# Altium footprint library Amin-Library.PcbLib: 601 footprints (part 27 of 38)
Each footprint in its own frame and in the unit in brackets; x right, y up, seen from the top. Pads: shape width x height; smd on the part's side, far side on the other; paste and mask are expansions set on the pad; w line width, h text height; cw(c..) or ccw(c..) is an arc to the next point about the centre after c.
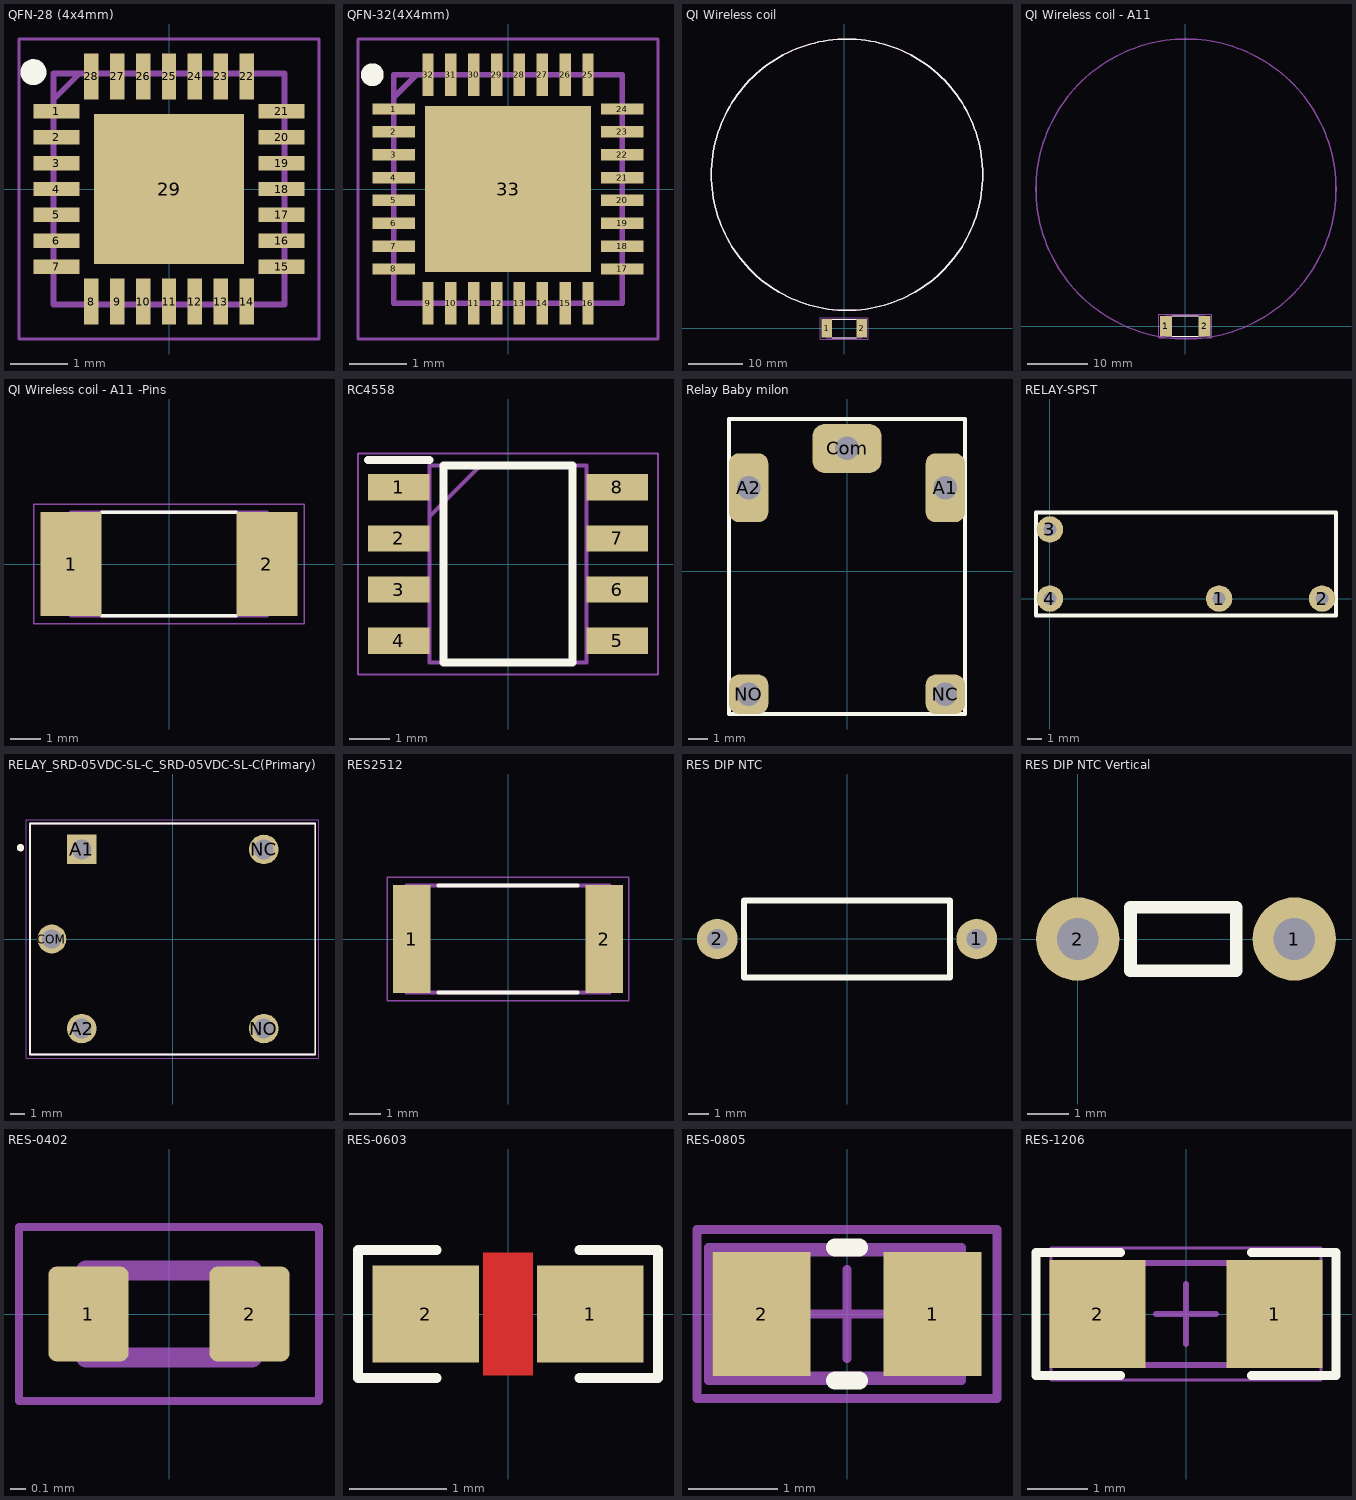
[diagram p26: the footprints below, top view; thin cyan lines are the x and y axes]

## QFN-28 (4x4mm) [mm]
pads (29):
  rect 0.8x0.25 smd: 1(-1.95,1.35) 2(-1.95,0.9) 3(-1.95,0.45) 4(-1.95,0) 5(-1.95,-0.45) 6(-1.95,-0.9) 7(-1.95,-1.35) 15(1.95,-1.35) 16(1.95,-0.9) 17(1.95,-0.45) 18(1.95,0) 19(1.95,0.45) 20(1.95,0.9) 21(1.95,1.35)
  rect 0.25x0.8 smd: 8(-1.35,-1.95) 9(-0.9,-1.95) 10(-0.45,-1.95) 11(0,-1.95) 12(0.45,-1.95) 13(0.9,-1.95) 14(1.35,-1.95) 22(1.35,1.95) 23(0.9,1.95) 24(0.45,1.95) 25(0,1.95) 26(-0.45,1.95) 27(-0.9,1.95) 28(-1.35,1.95)
  rect 2.6x2.6 smd: 29(0,0)
Top Overlay:
  circle w0.225: c-2.351,2.025 r0.112
Mechanical 15:
  lines w0.1: -2,1.55 -1.55,2 ; -2,-2 -2,2 2,2 2,-2 -2,-2
Mechanical 20:
  lines w0.05: -2.6,-2.6 -2.6,2.6 2.6,2.6 2.6,-2.6 -2.6,-2.6
3D body "QFN-28(4x4mm).stp": height 0.9, standoff 0, extent -2.05,-2.05 2.05,2.05

## QFN-32(4X4mm) [mm]
pads (33):
  rect 0.75x0.2 smd: 1(-2,1.4) 2(-2,1) 3(-2,0.6) 4(-2,0.2) 5(-2,-0.2) 6(-2,-0.6) 7(-2,-1) 8(-2,-1.4) 17(2,-1.4) 18(2,-1) 19(2,-0.6) 20(2,-0.2) 21(2,0.2) 22(2,0.6) 23(2,1) 24(2,1.4)
  rect 0.2x0.75 smd: 9(-1.4,-2) 10(-1,-2) 11(-0.6,-2) 12(-0.2,-2) 13(0.2,-2) 14(0.6,-2) 15(1,-2) 16(1.4,-2) 25(1.4,2) 26(1,2) 27(0.6,2) 28(0.2,2) 29(-0.2,2) 30(-0.6,2) 31(-1,2) 32(-1.4,2)
  rect 2.9x2.9 smd: 33(0,0)
Top Overlay:
  circle w0.2: c-2.375,2 r0.1
Mechanical 15:
  lines w0.1: -2,1.6 -1.6,2 ; -2,-2 -2,2 2,2 2,-2 -2,-2
Mechanical 20:
  lines w0.05: -2.625,-2.625 -2.625,2.625 2.625,2.625 2.625,-2.625 -2.625,-2.625

## QI Wireless coil [mm]
pads (2):
  rect 2x3.42 smd: 1(-3.22,0) 2(3.22,0)
Top Overlay:
  circle w0.254: c0.508,28.321 r25
  lines w0.127: -2.2,-1.7 2.2,-1.7 ; -2.2,1.7 2.2,1.7
Top Courtyard:
  circle w0.254: c0.508,28.321 r25
Mechanical 13:
  lines w0.127: -3.22,-1.7 3.22,-1.7 3.22,1.7 -3.22,1.7 -3.22,-1.7
Mechanical 15:
  lines w0.05: -4.445,-1.958 4.445,-1.958 4.445,1.958 -4.445,1.958 -4.445,-1.958
3D body "QI WIRELESS CHARGER COIL.STEP": height 2.72, standoff 0.01, extent -32.215,-4.783 32.052,59.483

## QI Wireless coil - A11 [mm]
pads (2):
  rect 2x3.42 smd: 1(-3.22,0) 2(3.22,0)
Top Overlay:
  lines w0.127: -2.2,-1.7 2.2,-1.7 ; -2.2,1.7 2.2,1.7
Top Courtyard:
  circle w0.254: c0.127,22.86 r25
Mechanical 13:
  lines w0.127: -3.22,-1.7 3.22,-1.7 3.22,1.7 -3.22,1.7 -3.22,-1.7
Mechanical 15:
  lines w0.05: -4.445,-1.958 4.445,-1.958 4.445,1.958 -4.445,1.958 -4.445,-1.958
3D body "QI WIRELESS CHARGER COIL.STEP": height 2.72, standoff 0.01, extent -32.157,-8.488 32.11,55.779

## QI Wireless coil - A11 -Pins [mm]
pads (2):
  rect 2x3.42 smd: 1(-3.22,0) 2(3.22,0)
Top Overlay:
  lines w0.127: -2.2,-1.7 2.2,-1.7 ; -2.2,1.7 2.2,1.7
Mechanical 13:
  lines w0.127: -3.22,-1.7 3.22,-1.7 3.22,1.7 -3.22,1.7 -3.22,-1.7
Mechanical 15:
  lines w0.05: -4.445,-1.958 4.445,-1.958 4.445,1.958 -4.445,1.958 -4.445,-1.958

## RC4558 [mm]
pads (8):
  rect 1.525x0.65 smd: 1(-2.712,1.905) 2(-2.712,0.635) 3(-2.712,-0.635) 4(-2.712,-1.905) 5(2.712,-1.905) 6(2.712,-0.635) 7(2.712,0.635) 8(2.712,1.905)
Top Overlay:
  lines w0.2: -3.475,2.58 -1.95,2.58 ; -1.6,-2.45 1.6,-2.45 1.6,2.45 -1.6,2.45 -1.6,-2.45
Mechanical 13:
  lines w0.1: -1.95,1.18 -0.68,2.45 ; -1.95,-2.45 1.95,-2.45 1.95,2.45 -1.95,2.45 -1.95,-2.45
Mechanical 15:
  lines w0.05: -3.725,-2.75 3.725,-2.75 3.725,2.75 -3.725,2.75 -3.725,-2.75
3D body "FR9886SOGTR.stp": height 1.75, standoff 0, extent -3,-2.45 3,2.45

## Relay Baby milon [mm] "relay baby milon 12v"
height 1.91
pads (5):
  rrect50% 2x3.5 hole 1.2: A1(5,4.25) A2(-5,4.25)
  rrect50% 3.5x2.5 hole 1.2: Com(0,6.25)
  rrect50% 2x2 hole 1.2: NC(5,-6.25) NO(-5,-6.25)
Top Overlay:
  lines w0.2: -6,-7.25 -6,7.75 6,7.75 6,-7.25 -6,-7.25
3D body "User Library-T74 4181.STEP": height 13.71, standoff -3.89, extent -6.131,-7.583 6.169,8.117

## RELAY-SPST [mm]
height 0.55
pads (4):
  round 1.8 hole 0.9: 1(11.5,0) 2(18.5,0) 3(0,4.7) 4(0,0)
Top Overlay:
  lines w0.254: -0.95,-1.15 19.45,-1.15 19.45,5.85 -0.95,5.85 -0.95,-1.15
3D body "role.STEP": height 14.91, standoff -3.39, extent -0.979,-1.187 19.521,6.013

## RELAY_SRD-05VDC-SL-C_SRD-05VDC-SL-C(Primary) [mm]
pads (5):
  rect 1.98x1.98 hole 1.32: A1(-6.1,6)
  round 1.98 hole 1.32: A2(-6.1,-6) NC(6.1,6) NO(6.1,-6)
  round 1.935 hole 1.29: COM(-8.1,0)
Top Overlay:
  circle w0.3: c-10.2,6.119 r0.1
  lines w0.127: -9.55,-7.75 9.55,-7.75 9.55,7.75 -9.55,7.75 -9.55,-7.75
Mechanical 4:
  lines w0.127: -9.55,-7.75 9.55,-7.75 ; -9.55,-7.75 -9.55,7.75 ; -9.55,-7.75 9.55,-7.75 ; -9.55,-7.75 -9.55,7.75 ; -9.55,7.75 9.55,7.75 ; -9.55,7.75 9.55,7.75 ; 9.55,-7.75 9.55,7.75 ; 9.55,-7.75 9.55,7.75
Mechanical 16:
  lines w0.05: -9.8,-8 9.8,-8 9.8,8 -9.8,8 -9.8,-8
3D body "SRD-05VDC-SL-C--3DModel-STEP-184599.STEP": height 16.15, standoff -4, extent -10.11,-7.5 8.89,7.5

## RES2512 [mm]
pads (2):
  rect 1.2x3.42 smd: 1(-3.055,0) 2(3.055,0)
Top Overlay:
  lines w0.127: -2.2,-1.7 2.2,-1.7 ; -2.2,1.7 2.2,1.7
Mechanical 13:
  lines w0.127: -3.22,-1.7 -3.22,1.7 3.22,1.7 3.22,-1.7 -3.22,-1.7
Mechanical 15:
  lines w0.05: -3.84,-1.958 -3.84,1.958 3.84,1.958 3.84,-1.958 -3.84,-1.958
3D body "User Library-Resistors_SMD.step": height 0.72, standoff 0.01, extent -3.245,-1.6 3.055,1.6

## RES DIP NTC [mm]
pads (2):
  round 2 hole 1: 1(6.4,0) 2(-6.4,0)
Top Overlay:
  lines w0.305: -5.08,-1.905 -5.08,1.905 5.08,1.905 5.08,-1.905 -5.08,-1.905
3D body "User Library-Res50-Axial 0_5W-3_3R.step": height 6.38, standoff -3, extent -6.725,-1.845 6.725,1.905

## RES DIP NTC Vertical [mm]
pads (2):
  round 2 hole 1: 1(5.207,0) 2(0,0)
Top Overlay:
  lines w0.305: 1.27,-0.762 3.81,-0.762 3.81,0.762 1.27,0.762 1.27,-0.762 ; 3.81,0 3.81,0
3D body "R_0,5W_VERT__D3,2__L9__Pitch-5__Spacing-5.stp": height 13.5, standoff -6.6, extent -0.402,-1.524 6.498,1.676

## RES-0402 [mm]
pads (2):
  rrect20% 0.508x0.6 smd: 1(-0.51,0) 2(0.51,0)
Mechanical 13:
  lines w0.127: -0.525,-0.275 0.525,-0.275 0.525,0.275 -0.525,0.275 -0.525,-0.275
Mechanical 15:
  lines w0.05: -0.95,-0.55 0.95,-0.55 0.95,0.55 -0.95,0.55 -0.95,-0.55
3D body "R 0402.STEP": height 0.3, standoff 0, extent -0.5,-0.25 0.5,0.25

## RES-0603 [mm]
height 4.32
pads (2):
  rect 1.1x1 smd: 1(0.85,0) 2(-0.85,0)
Top Layer:
  pour cut-out: 0.254,0.635 -0.254,0.635 -0.254,-0.635 0.254,-0.635
Top Overlay:
  lines w0.1: -0.737,-0.66 -1.549,-0.66 -1.549,0 -1.549,0.66 -0.737,0.66 ; 0.737,-0.66 1.549,-0.66 1.549,0 1.549,0.66 0.737,0.66
3D body "User Library-TNPW0603.STEP": height 0.45, standoff 0, extent -0.8,-0.425 0.8,0.425

## RES-0805 [mm]
height 0.5
pads (2):
  rect 1.1x1.4 smd: 1(0.962,0) 2(-0.962,0)
Top Overlay:
  lines w0.2: -0.137,-0.75 0.138,-0.75 ; -0.137,0.75 0.138,0.75
Mechanical 13:
  lines w0.1: -1.213,-0.7 -1.213,0.7 0.937,0.7 0.937,-0.7 -1.213,-0.7
Mechanical 15:
  lines w0.1: -0.5,0 0.5,0 ; 0,-0.5 0,0.5 ; -1.69,-0.95 1.687,-0.95 1.687,0.95 -1.69,0.95 -1.69,-0.95 ; -1.563,-0.75 -1.563,0.75 1.287,0.75 1.287,-0.75 -1.563,-0.75
3D body "0805.STEP": height 0.6, standoff 0, extent -1.016,-0.635 1.016,0.635

## RES-1206 [mm]
height 0.94
pads (2):
  rect 1.6x1.8 smd: 1(1.475,0) 2(-1.475,0)
Top Overlay:
  lines w0.15: -1.088,-1.025 -2.5,-1.025 -2.5,1.025 -1.088,1.025 ; 1.088,-1.025 2.5,-1.025 2.5,1.025 1.088,1.025
Mechanical 13:
  lines w0.1: -1.65,-0.85 1.65,-0.85 1.65,0.85 -1.65,0.85 -1.65,-0.85
Mechanical 15:
  lines w0.05: -2.25,-1.1 2.25,-1.1 2.25,1.1 -2.25,1.1 -2.25,-1.1
  lines w0.1: -0.5,0 0.5,0 ; 0,-0.5 0,0.5
3D body "RES1206.step": height 0.94, standoff 0, extent -1.65,-0.85 1.65,0.85